# Altium footprint library Librairie_projet.PcbLib: 16 footprints
Each footprint in its own frame and in the unit in brackets; x right, y up, seen from the top. Pads: shape width x height; smd on the part's side, far side on the other; paste and mask are expansions set on the pad; w line width, h text height; cw(c..) or ccw(c..) is an arc to the next point about the centre after c.
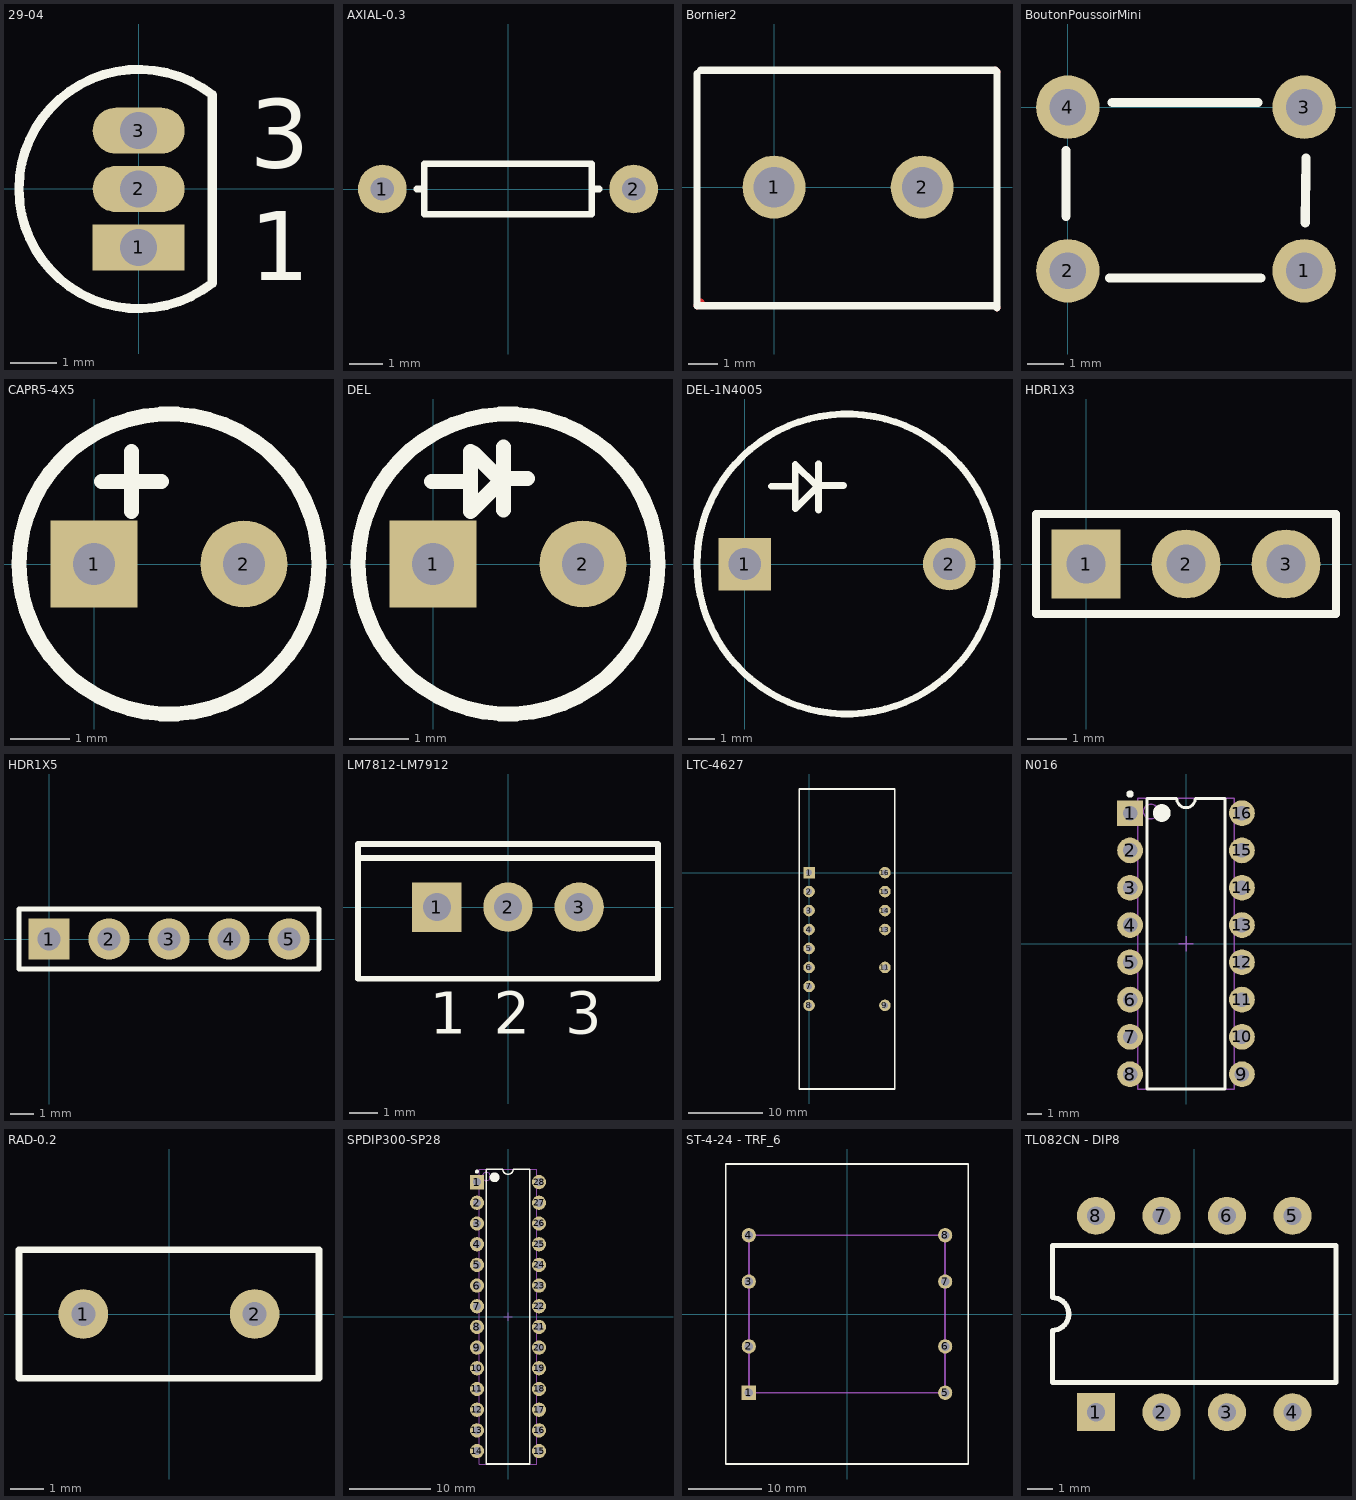
[diagram p0: the footprints below, top view; thin cyan lines are the x and y axes]

## 29-04 [mm] "TO, Flat Index; 3 In-Line, Axial Leads; Body Dia. 4.8mm; Leads 0.48 x 0.5 mm (max)"
height 5.33
pads (3):
  rect 2x1 hole 0.8: 1(0,-1.27)
  oval 2x1 hole 0.8: 2(0,0) 3(0,1.27)
Top Overlay:
  lines w0.2: 1.601,-2.049 cw(c0,0) 1.601,2.049 ; 1.6,-1.99 1.6,1.99
  text "1" at 2.421,-1.979 h1.5
  text "3" at 2.421,0.467 h1.5

## AXIAL-0.3 [mil] "Axial Device, Thru-Hole; 2 Leads; 0.3 in Pin Spacing (modifié)"
height 60
pads (2):
  round 58 hole 28: 1(-150,0) 2(150,0)
Top Overlay:
  lines w7.87: -109,0 -100,0 ; 109,0 100,0 ; 100,0 100,30 -100,30 -100,-30 100,-30 100,0

## Bornier2 [mil] "Bornier à vis à 2 positions"
height 393.7
pads (2):
  round 85 hole 55: 1(0,0) 2(200,0)
Top Layer:
  lines w10: -104,-160 -99,-155 ; 298,-160 301,-163 ; 299,158 301,156
Top Overlay:
  lines w10: -104,153 -104,-160 298,-160 ; -99,158 299,158 ; 301,-163 301,156

## BoutonPoussoirMini [mm] "Bouton poussoir 6mm x 6 mm flat type"
pads (4):
  round 1.75 hole 1: 1(6.5,-4.5) 2(0,-4.5) 3(6.5,0) 4(0,0)
Top Overlay:
  lines w0.254: -0.051,-2.997 -0.051,-1.194 ; 1.143,-4.699 5.309,-4.699 ; 1.219,0.127 5.232,0.127 ; 6.528,-3.175 6.553,-1.397

## CAPR5-4X5 [mil] "Capacitor; 2 Leads; Condensateur electrolytique; 1uF et plus"
pads (2):
  rect 58x58 hole 28: 1(0,0)
  round 58 hole 28: 2(100,0)
Top Overlay:
  circle w10: c50,0 r100
  lines w10: 5,55 45,55 ; 25,35 25,75

## DEL [mil]
pads (2):
  rect 58x58 hole 28: 1(0,0)
  round 58 hole 28: 2(100,0)
Top Overlay:
  circle w10: c50,0 r100
  lines w10: -1,55 23,55 ; 25,75 25,35 45,55 ; 27,74 44,57 ; 47,36 47,78 ; 47,57 63,57

## DEL-1N4005 [mil] "Diode 1N4005"
pads (2):
  rect 77x77 hole 47: 1(0,0)
  round 77 hole 47: 2(300,0)
Top Overlay:
  circle w10: c150,0 r220
  lines w10: 39,114 74,114 ; 105,115 74,146 74,81 108,115 145,115 ; 108,79 108,147

## HDR1X3 [mil] "Connector; Header; 3 Position (modifié)"
pads (3):
  rect 69x69 hole 39: 1(0,0)
  round 69 hole 39: 2(100,0) 3(200,0)
Top Overlay:
  lines w7.87: -50,-50 250,-50 250,50 -50,50 -50,-50

## HDR1X5 [mil] "Connector; Header; 5 Position (modifié)"
pads (5):
  rect 69x69 hole 39: 1(0,0)
  round 69 hole 39: 2(100,0) 3(200,0) 4(300,0) 5(400,0)
Top Overlay:
  lines w7.87: -50,-50 -50,50 450,50 450,-50 -50,-50

## LM7812-LM7912 [mm] "TO, Thru-Hole, Vertical, Heatsink Mounted; 3 In-Line Leads; Pitch 2.54 mm; TO-220-AB"
height 19.1
pads (3):
  rect 1.762x1.762 hole 1: 1(-2.54,0)
  round 1.762 hole 1: 2(0,0) 3(2.54,0)
Top Overlay:
  lines w0.2: -5.35,1.75 5.35,1.75 ; -5.35,-2.55 5.35,-2.55 5.35,2.25 -5.35,2.25 -5.35,-2.55
  text "1" at -2.79,-4.525 h1.5
  text "2" at -0.5,-4.525 h1.5
  text "3" at 2.04,-4.525 h1.5

## LTC-4627 [mil]
pads (14):
  rect 61x61 hole 31: 1(0,0)
  round 61 hole 31: 2(0,-100) 3(0,-200) 4(0,-300) 5(0,-400) 6(0,-500) 7(0,-600) 8(0,-700) 9(400,-700) 11(400,-500) 13(400,-300) 14(400,-200) 15(400,-100) 16(400,0)
Top Overlay:
  lines w10: -52,-1141 452,-1141 452,441 -52,441 -52,-1141

## N016 [mil] "DIP, 16-Leads, Row Spacing 7.62mm, Pitch 2.54mm, Body 19.31x6.35mm"
height 200
pads (16):
  rect 69x69 hole 39: 1(-150,350)
  round 69 hole 39: 2(-150,250) 3(-150,150) 4(-150,50) 5(-150,-50) 6(-150,-150) 7(-150,-250) 8(-150,-350) 9(150,-350) 10(150,-250) 11(150,-150) 12(150,-50) 13(150,50) 14(150,150) 15(150,250) 16(150,350)
Top Overlay:
  circle w9.84: c-150,401.18 r4.92
  circle w23.62: c-64.96,350.39 r11.81
  lines w7.87: -104.33,-389.76 -104.33,389.76 -25,389.76 ccw(c0,389.76) 25,389.76 104.33,389.76 104.33,-389.76 -104.33,-389.76
Mechanical 13:
  circle w3.94: c-94.49,354.33 r19.68
  lines w3.94: -129.92,-389.76 -129.92,389.76 129.92,389.76 129.92,-389.76 -129.92,-389.76
Mechanical 15:
  lines w3.94: -19.68,0 19.68,0 ; 0,-19.68 0,19.68
3D body: height 200, standoff 0, extent -128.27,-388.11 131.57,391.41

## RAD-0.2 [mil] "Radial Cap, Thru-Hole; 2 Leads; 0.2 in Pin Spacing; Condensateur ceramique; moins de 1uF"
pads (2):
  round 58 hole 28: 1(-100,0) 2(100,0)
Top Overlay:
  lines w7.87: -175,-75 175,-75 175,75 -175,75 -175,-75

## SPDIP300-SP28 [mil] "DIP, 28-Leads, Row Spacing 7.62mm, Pitch 2.54mm, Body 34.9x6.8mm (Modifié)"
height 200
pads (28):
  rect 69x69 hole 39: 1(-150,650)
  round 69 hole 39: 2(-150,550) 3(-150,450) 4(-150,350) 5(-150,250) 6(-150,150) 7(-150,50) 8(-150,-50) 9(-150,-150) 10(-150,-250) 11(-150,-350) 12(-150,-450) 13(-150,-550) 14(-150,-650) 15(150,-650) 16(150,-550) 17(150,-450) 18(150,-350) 19(150,-250) 20(150,-150) 21(150,-50) 22(150,50) 23(150,150) 24(150,250) 25(150,350) 26(150,450) 27(150,550) 28(150,650)
Top Overlay:
  circle w9.84: c-150,701.18 r4.92
  circle w23.62: c-64.96,673.23 r11.81
  lines w7.87: -104.33,-712.6 -104.33,712.6 -25,712.6 ccw(c0,712.6) 25,712.6 104.33,712.6 104.33,-712.6 -104.33,-712.6
Mechanical 13:
  circle w3.94: c-104.33,677.17 r19.68
  lines w3.94: -139.76,-712.6 -139.76,712.6 139.76,712.6 139.76,-712.6 -139.76,-712.6
Mechanical 15:
  lines w3.94: -19.68,0 19.68,0 ; 0,-19.68 0,19.68
3D body: height 200, standoff 0, extent -139.76,-712.6 139.76,712.6

## ST-4-24 - TRF_6 [mil] "Transformateur; Three-winding Transformer (Non-Ideal); Primaire 115V Secondaires 12V; 6 Leads"
pads (8):
  rect 77x77 hole 47: 1(-530,-425)
  round 77 hole 47: 2(-530,-175) 3(-530,175) 4(-530,425) 5(530,-425) 6(530,-175) 7(530,175) 8(530,425)
Top Overlay:
  lines w10: -655,-810 655,-810 655,810 -655,810 -655,-810
Mechanical 1:
  lines w10: -530,-425 530,-425 530,425 -530,425 -530,-425

## TL082CN - DIP8 [mil] "DIP; 8 Leads; Row Spacing 7.62 mm; Pitch 2.54 mm"
height 200
pads (8):
  rect 58x58 hole 28: 1(-150,-150)
  round 58 hole 28: 2(-50,-150) 3(50,-150) 4(150,-150) 5(150,150) 6(50,150) 7(-50,150) 8(-150,150)
Top Overlay:
  lines w7.87: -216.53,-104.33 216.53,-104.33 216.53,104.33 -216.53,104.33 -216.53,25 cw(c-216.53,0) -216.53,-25 -216.53,-104.33